# Altium footprint library STC系列芯片.PcbLib: 60 footprints (part 2 of 4)
Each footprint in its own frame and in the unit in brackets; x right, y up, seen from the top. Pads: shape width x height; smd on the part's side, far side on the other; paste and mask are expansions set on the pad; w line width, h text height; cw(c..) or ccw(c..) is an arc to the next point about the centre after c.
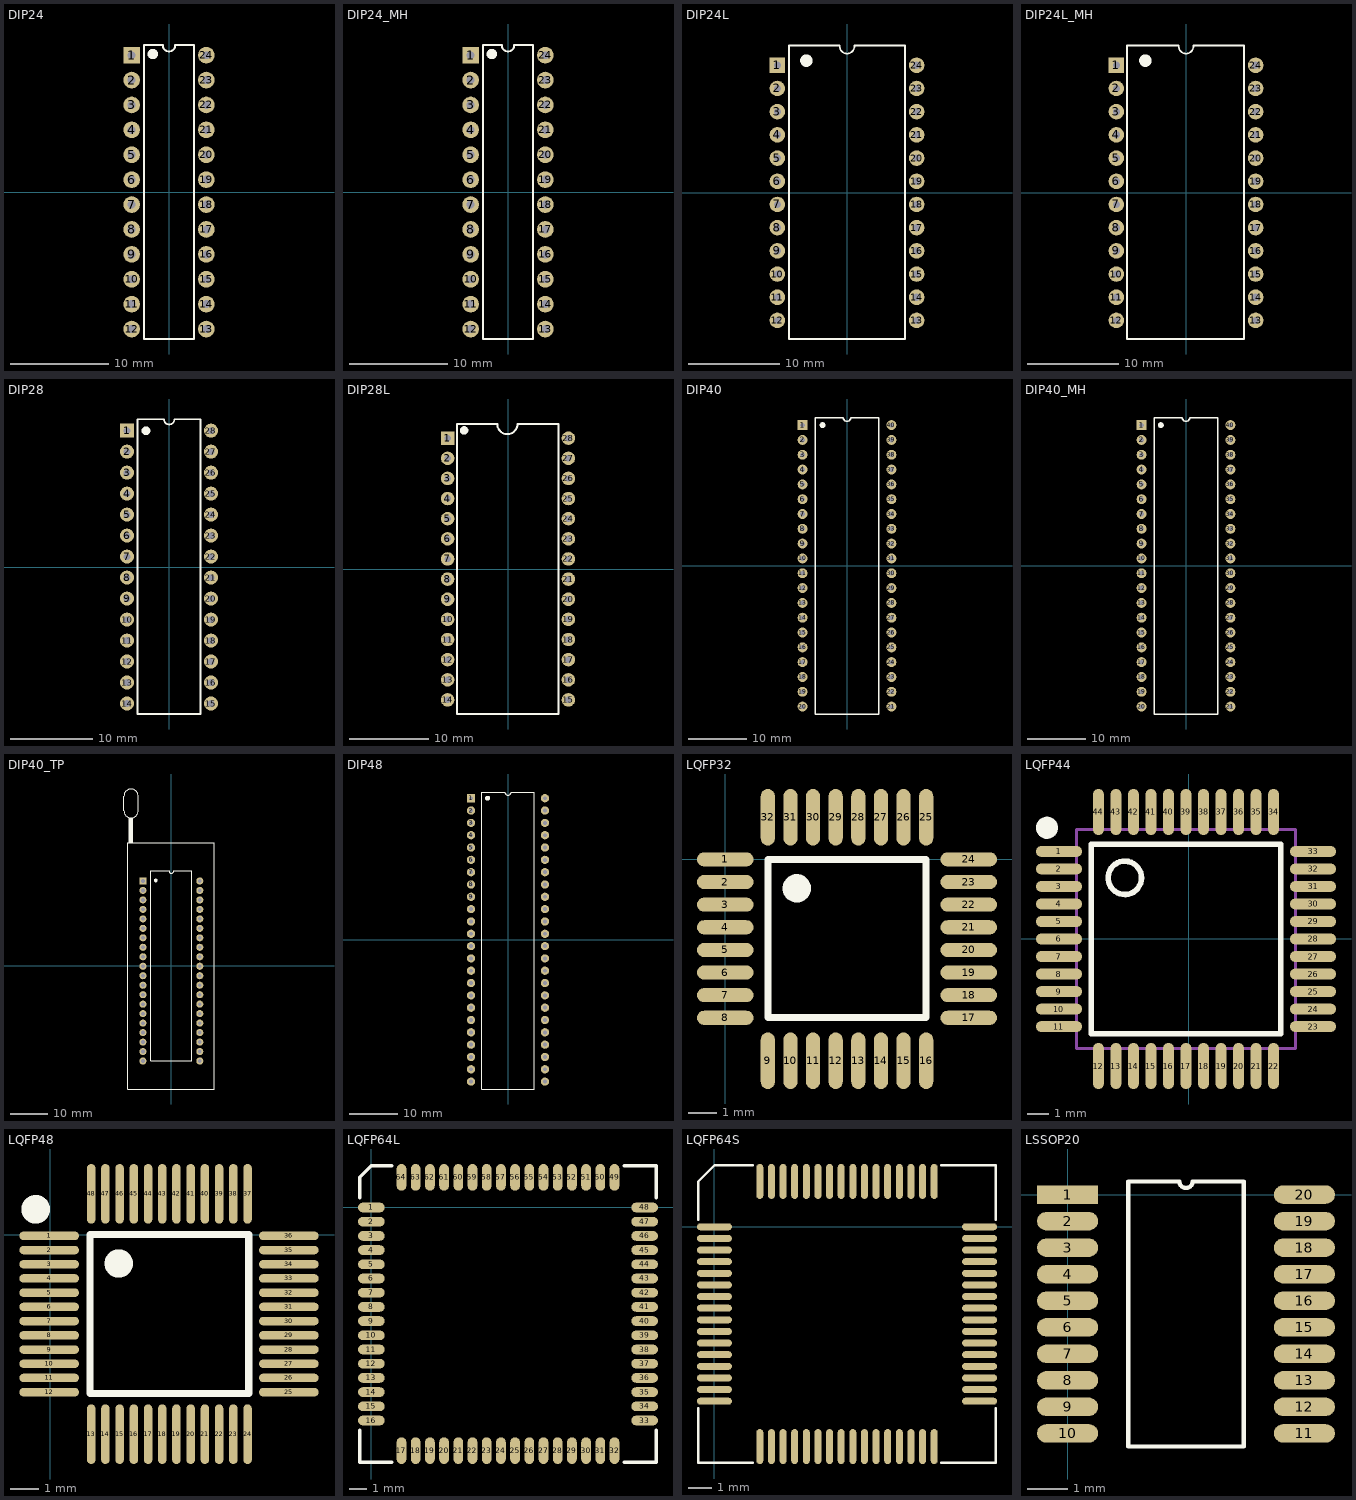
[diagram p1: the footprints below, top view; thin cyan lines are the x and y axes]

## DIP24 [mm]
pads (24):
  rect 1.7x1.7 hole 0.8: 1(-3.81,13.97)
  round 1.7 hole 0.8: 2(-3.81,11.43) 3(-3.81,8.89) 4(-3.81,6.35) 5(-3.81,3.81) 6(-3.81,1.27) 7(-3.81,-1.27) 8(-3.81,-3.81) 9(-3.81,-6.35) 10(-3.81,-8.89) 11(-3.81,-11.43) 12(-3.81,-13.97) 13(3.81,-13.97) 14(3.81,-11.43) 15(3.81,-8.89) 16(3.81,-6.35) 17(3.81,-3.81) 18(3.81,-1.27) 19(3.81,1.27) 20(3.81,3.81) 21(3.81,6.35) 22(3.81,8.89) 23(3.81,11.43) 24(3.81,13.97)
Top Overlay:
  circle w0.8: c-1.651,14.086 r0.127
  lines w0.2: -2.54,-14.986 2.54,-14.986 2.54,14.986 0.635,14.986 cw(c0,14.986) -0.635,14.986 -2.54,14.986 -2.54,-14.986
3D body "DIP24.STEP": height 4.8, standoff -3, extent -4,-15.506 4,15.494

## DIP24_MH [mm]
pads (24):
  rect 1.7x1.7 hole 0.8: 1(-3.81,13.97)
  round 1.7 hole 0.8: 2(-3.81,11.43) 3(-3.81,8.89) 4(-3.81,6.35) 5(-3.81,3.81) 6(-3.81,1.27) 7(-3.81,-1.27) 8(-3.81,-3.81) 9(-3.81,-6.35) 10(-3.81,-8.89) 11(-3.81,-11.43) 12(-3.81,-13.97) 13(3.81,-13.97) 14(3.81,-11.43) 15(3.81,-8.89) 16(3.81,-6.35) 17(3.81,-3.81) 18(3.81,-1.27) 19(3.81,1.27) 20(3.81,3.81) 21(3.81,6.35) 22(3.81,8.89) 23(3.81,11.43) 24(3.81,13.97)
Top Overlay:
  circle w0.8: c-1.651,14.086 r0.127
  lines w0.2: -2.54,-14.986 2.54,-14.986 2.54,14.986 0.635,14.986 cw(c0,14.986) -0.635,14.986 -2.54,14.986 -2.54,-14.986
3D body "DIP24.STEP": height 7.85, standoff 0.04, extent -4,-15.633 4,15.367
3D body "DIP24_MH.STEP": height 4.95, standoff -3.05, extent -5.025,-15.506 5.025,15.494

## DIP24L [mm]
pads (24):
  rect 1.7x1.7 hole 0.8: 1(-7.62,13.97)
  round 1.7 hole 0.8: 2(-7.62,11.43) 3(-7.62,8.89) 4(-7.62,6.35) 5(-7.62,3.81) 6(-7.62,1.27) 7(-7.62,-1.27) 8(-7.62,-3.81) 9(-7.62,-6.35) 10(-7.62,-8.89) 11(-7.62,-11.43) 12(-7.62,-13.97) 13(7.62,-13.97) 14(7.62,-11.43) 15(7.62,-8.89) 16(7.62,-6.35) 17(7.62,-3.81) 18(7.62,-1.27) 19(7.62,1.27) 20(7.62,3.81) 21(7.62,6.35) 22(7.62,8.89) 23(7.62,11.43) 24(7.62,13.97)
Top Overlay:
  circle w1: c-4.445,14.478 r0.18
  lines w0.2: -0.796,16.121 ccw(c0.004,16.044) 0.803,16.134 ; -0.796,16.14 -6.35,16.14 -6.35,-16.002 6.35,-16.002 6.35,16.14 0.803,16.14
3D body "DIP24L.STEP": height 4.75, standoff -3.05, extent -7.713,-16.244 7.747,16.256

## DIP24L_MH [mm]
pads (24):
  rect 1.7x1.7 hole 0.8: 1(-7.62,13.97)
  round 1.7 hole 0.8: 2(-7.62,11.43) 3(-7.62,8.89) 4(-7.62,6.35) 5(-7.62,3.81) 6(-7.62,1.27) 7(-7.62,-1.27) 8(-7.62,-3.81) 9(-7.62,-6.35) 10(-7.62,-8.89) 11(-7.62,-11.43) 12(-7.62,-13.97) 13(7.62,-13.97) 14(7.62,-11.43) 15(7.62,-8.89) 16(7.62,-6.35) 17(7.62,-3.81) 18(7.62,-1.27) 19(7.62,1.27) 20(7.62,3.81) 21(7.62,6.35) 22(7.62,8.89) 23(7.62,11.43) 24(7.62,13.97)
Top Overlay:
  circle w1: c-4.445,14.478 r0.18
  lines w0.2: -0.796,16.121 ccw(c0.004,16.044) 0.803,16.134 ; -0.796,16.14 -6.46,16.14 -6.46,-16.002 6.35,-16.002 6.35,16.14 0.803,16.14
3D body "DIP24L.STEP": height 8.56, standoff 0.76, extent -7.73,-16.371 7.73,16.129
3D body "DIP24L_MH.STEP": height 4.95, standoff -3.05, extent -8.845,-15.506 8.845,15.494

## DIP28 [mm]
pads (28):
  rect 1.7x1.7 hole 0.8: 1(-5.08,16.51)
  round 1.7 hole 0.8: 2(-5.08,13.97) 3(-5.08,11.43) 4(-5.08,8.89) 5(-5.08,6.35) 6(-5.08,3.81) 7(-5.08,1.27) 8(-5.08,-1.27) 9(-5.08,-3.81) 10(-5.08,-6.35) 11(-5.08,-8.89) 12(-5.08,-11.43) 13(-5.08,-13.97) 14(-5.08,-16.51) 15(5.08,-16.51) 16(5.08,-13.97) 17(5.08,-11.43) 18(5.08,-8.89) 19(5.08,-6.35) 20(5.08,-3.81) 21(5.08,-1.27) 22(5.08,1.27) 23(5.08,3.81) 24(5.08,6.35) 25(5.08,8.89) 26(5.08,11.43) 27(5.08,13.97) 28(5.08,16.51)
Top Overlay:
  circle w0.8: c-2.794,16.51 r0.127
  lines w0.2: -3.81,-17.78 -3.81,17.893 -0.61,17.893 ccw(c0.025,17.893) 0.66,17.893 3.81,17.893 3.81,-17.78 -3.81,-17.78
3D body "DIP28.STEP": height 4.5, standoff -3.4, extent -5.153,-18.093 5.407,17.907

## DIP28L [mm]
pads (28):
  rect 1.7x1.7 hole 0.8: 1(-7.62,16.51)
  round 1.7 hole 0.8: 2(-7.62,13.97) 3(-7.62,11.43) 4(-7.62,8.89) 5(-7.62,6.35) 6(-7.62,3.81) 7(-7.62,1.27) 8(-7.62,-1.27) 9(-7.62,-3.81) 10(-7.62,-6.35) 11(-7.62,-8.89) 12(-7.62,-11.43) 13(-7.62,-13.97) 14(-7.62,-16.51) 15(7.62,-16.51) 16(7.62,-13.97) 17(7.62,-11.43) 18(7.62,-8.89) 19(7.62,-6.35) 20(7.62,-3.81) 21(7.62,-1.27) 22(7.62,1.27) 23(7.62,3.81) 24(7.62,6.35) 25(7.62,8.89) 26(7.62,11.43) 27(7.62,13.97) 28(7.62,16.51)
Top Overlay:
  circle w0.8: c-5.537,17.49 r0.127
  lines w0.254: -6.46,18.277 -6.46,-18.288 6.35,-18.288 6.35,18.288 1.185,18.288 cw(c-0.085,18.288) -1.355,18.288 -6.435,18.288
3D body "DIP28.STEP": height 4.7, standoff -3.2, extent -7.78,-18.631 7.78,18.669

## DIP40 [mm]
pads (40):
  rect 1.7x1.7 hole 0.8: 1(-7.62,24.13)
  round 1.7 hole 0.8: 2(-7.62,21.59) 3(-7.62,19.05) 4(-7.62,16.51) 5(-7.62,13.97) 6(-7.62,11.43) 7(-7.62,8.89) 8(-7.62,6.35) 9(-7.62,3.81) 10(-7.62,1.27) 11(-7.62,-1.27) 12(-7.62,-3.81) 13(-7.62,-6.35) 14(-7.62,-8.89) 15(-7.62,-11.43) 16(-7.62,-13.97) 17(-7.62,-16.51) 18(-7.62,-19.05) 19(-7.62,-21.59) 20(-7.62,-24.13) 21(7.62,-24.13) 22(7.62,-21.59) 23(7.62,-19.05) 24(7.62,-16.51) 25(7.62,-13.97) 26(7.62,-11.43) 27(7.62,-8.89) 28(7.62,-6.35) 29(7.62,-3.81) 30(7.62,-1.27) 31(7.62,1.27) 32(7.62,3.81) 33(7.62,6.35) 34(7.62,8.89) 35(7.62,11.43) 36(7.62,13.97) 37(7.62,16.51) 38(7.62,19.05) 39(7.62,21.59) 40(7.62,24.13)
Top Overlay:
  circle w0.508: c-4.191,24.13 r0.254
  lines w0.254: -5.461,-25.4 5.461,-25.4 5.461,25.4 0.635,25.4 cw(c0,25.4) -0.635,25.4 -5.461,25.4 -5.461,-25.4
3D body "DIP40.STEP": height 4.7, standoff -3.2, extent -7.907,-26.191 7.653,26.162

## DIP40_MH [mm]
pads (40):
  rect 1.7x1.7 hole 0.8: 1(-7.62,24.13)
  round 1.7 hole 0.8: 2(-7.62,21.59) 3(-7.62,19.05) 4(-7.62,16.51) 5(-7.62,13.97) 6(-7.62,11.43) 7(-7.62,8.89) 8(-7.62,6.35) 9(-7.62,3.81) 10(-7.62,1.27) 11(-7.62,-1.27) 12(-7.62,-3.81) 13(-7.62,-6.35) 14(-7.62,-8.89) 15(-7.62,-11.43) 16(-7.62,-13.97) 17(-7.62,-16.51) 18(-7.62,-19.05) 19(-7.62,-21.59) 20(-7.62,-24.13) 21(7.62,-24.13) 22(7.62,-21.59) 23(7.62,-19.05) 24(7.62,-16.51) 25(7.62,-13.97) 26(7.62,-11.43) 27(7.62,-8.89) 28(7.62,-6.35) 29(7.62,-3.81) 30(7.62,-1.27) 31(7.62,1.27) 32(7.62,3.81) 33(7.62,6.35) 34(7.62,8.89) 35(7.62,11.43) 36(7.62,13.97) 37(7.62,16.51) 38(7.62,19.05) 39(7.62,21.59) 40(7.62,24.13)
Top Overlay:
  circle w0.508: c-4.318,24.13 r0.254
  lines w0.254: -5.461,-25.4 -5.461,25.4 -0.635,25.4 ccw(c0,25.4) 0.635,25.4 5.461,25.4 5.461,-25.4 -5.461,-25.4
3D body "DIP40.STEP": height 8.51, standoff 0.61, extent -7.907,-26.191 7.653,26.162
3D body "DIP40_MH.STEP": height 5.2, standoff -3, extent -9.027,-25.327 8.773,25.273

## DIP40_TP [mm]
pads (40):
  rect 1.9x1.9 hole 1: 1(-7.62,22.733)
  round 1.9 hole 1: 2(-7.62,20.193) 3(-7.62,17.653) 4(-7.62,15.113) 5(-7.62,12.573) 6(-7.62,10.033) 7(-7.62,7.493) 8(-7.62,4.953) 9(-7.62,2.413) 10(-7.62,-0.127) 11(-7.62,-2.667) 12(-7.62,-5.207) 13(-7.62,-7.747) 14(-7.62,-10.287) 15(-7.62,-12.827) 16(-7.62,-15.367) 17(-7.62,-17.907) 18(-7.62,-20.447) 19(-7.62,-22.987) 20(-7.62,-25.527) 21(7.62,-25.527) 22(7.62,-22.987) 23(7.62,-20.447) 24(7.62,-17.907) 25(7.62,-15.367) 26(7.62,-12.827) 27(7.62,-10.287) 28(7.62,-7.747) 29(7.62,-5.207) 30(7.62,-2.667) 31(7.62,-0.127) 32(7.62,2.413) 33(7.62,4.953) 34(7.62,7.493) 35(7.62,10.033) 36(7.62,12.573) 37(7.62,15.113) 38(7.62,17.653) 39(7.62,20.193) 40(7.62,22.733)
Top Overlay:
  circle w0.508: c-4.191,22.86 r0.254
  lines w0.254: -11.303,33.02 -11.303,39.624 ; -11.049,33.02 -11.049,39.624 ; -10.922,33.147 -10.922,39.497 ; -10.668,33.02 -10.668,39.624 ; -10.414,33.02 -10.414,39.624 ; -12.7,41.529 ccw(c-10.795,41.529) -8.89,41.529 -8.89,45.466 ccw(c-10.795,45.466) -12.7,45.466 -12.7,41.529 ; -11.684,-33.02 11.43,-33.02 11.43,33.02 -11.684,33.02 -11.684,-33.02 ; -5.461,-25.4 5.461,-25.4 5.461,25.4 0.635,25.4 cw(c0,25.4) -0.635,25.4 -5.461,25.4 -5.461,-25.4
3D body "DIP40.STEP": height 16.64, standoff 8.73, extent -7.907,-28.096 7.653,24.257
3D body "DIP40_TP.STEP": height 11.65, standoff -3.15, extent -12.847,-32.707 11.303,47.693

## DIP48 [mm]
pads (48):
  rect 1.7x1.7 hole 0.8: 1(-7.62,29.21)
  round 1.7 hole 0.8: 2(-7.62,26.67) 3(-7.62,24.13) 4(-7.62,21.59) 5(-7.62,19.05) 6(-7.62,16.51) 7(-7.62,13.97) 8(-7.62,11.43) 9(-7.62,8.89) 10(-7.62,6.35) 11(-7.62,3.81) 12(-7.62,1.27) 13(-7.62,-1.27) 14(-7.62,-3.81) 15(-7.62,-6.35) 16(-7.62,-8.89) 17(-7.62,-11.43) 18(-7.62,-13.97) 19(-7.62,-16.51) 20(-7.62,-19.05) 21(-7.62,-21.59) 22(-7.62,-24.13) 23(-7.62,-26.67) 24(-7.62,-29.21) 25(7.62,-29.21) 26(7.62,-26.67) 27(7.62,-24.13) 28(7.62,-21.59) 29(7.62,-19.05) 30(7.62,-16.51) 31(7.62,-13.97) 32(7.62,-11.43) 33(7.62,-8.89) 34(7.62,-6.35) 35(7.62,-3.81) 36(7.62,-1.27) 37(7.62,1.27) 38(7.62,3.81) 39(7.62,6.35) 40(7.62,8.89) 41(7.62,11.43) 42(7.62,13.97) 43(7.62,16.51) 44(7.62,19.05) 45(7.62,21.59) 46(7.62,24.13) 47(7.62,26.67) 48(7.62,29.21)
Top Overlay:
  circle w0.508: c-4.191,29.21 r0.254
  lines w0.254: -5.461,-30.734 -5.461,30.48 -0.635,30.48 ccw(c0,30.48) 0.635,30.48 5.461,30.48 5.461,-30.734 -5.461,-30.734
3D body "DIP48.STEP": height 4.7, standoff -3.2, extent -7.902,-30.756 7.648,30.734

## LQFP32 [mm]
pads (32):
  oval 2x0.5 smd: 1(0,0) 2(0,-0.8) 3(0,-1.6) 4(0,-2.4) 5(0,-3.2) 6(0,-4) 7(0,-4.8) 8(0,-5.6) 17(8.606,-5.6) 18(8.606,-4.8) 19(8.606,-4) 20(8.606,-3.2) 21(8.606,-2.4) 22(8.606,-1.6) 23(8.606,-0.8) 24(8.606,0)
  oval 0.5x2 smd: 9(1.503,-7.117) 10(2.303,-7.117) 11(3.103,-7.117) 12(3.903,-7.117) 13(4.703,-7.117) 14(5.503,-7.117) 15(6.303,-7.117) 16(7.103,-7.117) 25(7.103,1.489) 26(6.303,1.489) 27(5.503,1.489) 28(4.703,1.489) 29(3.903,1.489) 30(3.103,1.489) 31(2.303,1.489) 32(1.503,1.489)
Top Overlay:
  circle w0.5: c2.525,-1.022 r0.25
  lines w0.254: 1.509,-5.594 1.509,-0.006 7.097,-0.006 7.097,-5.594 1.509,-5.594
3D body "LQFP32.STEP": height 1.63, standoff -0.09, extent -0.193,-7.325 8.807,1.675

## LQFP44 [mm]
pads (44):
  oval 2.1x0.5 smd: 1(-5.927,4) 2(-5.927,3.2) 3(-5.927,2.4) 4(-5.927,1.6) 5(-5.927,0.8) 6(-5.927,0) 7(-5.927,-0.8) 8(-5.927,-1.6) 9(-5.927,-2.4) 10(-5.927,-3.2) 11(-5.927,-4) 23(5.673,-4) 24(5.673,-3.2) 25(5.673,-2.4) 26(5.673,-1.6) 27(5.673,-0.8) 28(5.673,0) 29(5.673,0.8) 30(5.673,1.6) 31(5.673,2.4) 32(5.673,3.2) 33(5.673,4)
  oval 0.5x2.1 smd: 12(-4.127,-5.8) 13(-3.327,-5.8) 14(-2.527,-5.8) 15(-1.727,-5.8) 16(-0.927,-5.8) 17(-0.127,-5.8) 18(0.673,-5.8) 19(1.473,-5.8) 20(2.273,-5.8) 21(3.073,-5.8) 22(3.873,-5.8) 34(3.873,5.8) 35(3.073,5.8) 36(2.273,5.8) 37(1.473,5.8) 38(0.673,5.8) 39(-0.127,5.8) 40(-0.927,5.8) 41(-1.727,5.8) 42(-2.527,5.8) 43(-3.327,5.8) 44(-4.127,5.8)
Top Overlay:
  circle w0.254: c-2.921,2.794 r0.762
  circle w0.508: c-6.477,5.08 r0.25
  lines w0.254: -4.445,-4.318 -4.445,4.318 4.191,4.318 4.191,-4.318 -4.445,-4.318
Mechanical 13:
  lines w0.15: -5.127,-5 -5.127,5 4.873,5 4.873,-5 -5.127,-5
3D body "LQFP44.STEP": height 1.5, standoff 0.02, extent -6.127,-6 5.873,6

## LQFP48 [mm]
pads (48):
  oval 2.1x0.3 smd: 1(-0.036,-0.044) 2(-0.036,-0.544) 3(-0.036,-1.044) 4(-0.036,-1.544) 5(-0.036,-2.044) 6(-0.036,-2.544) 7(-0.036,-3.044) 8(-0.036,-3.544) 9(-0.036,-4.044) 10(-0.036,-4.544) 11(-0.036,-5.044) 12(-0.036,-5.544) 25(8.393,-5.544) 26(8.393,-5.044) 27(8.393,-4.544) 28(8.393,-4.044) 29(8.393,-3.544) 30(8.393,-3.044) 31(8.393,-2.544) 32(8.393,-2.044) 33(8.393,-1.544) 34(8.393,-1.044) 35(8.393,-0.544) 36(8.393,-0.044)
  oval 0.3x2.1 smd: 13(1.441,-7.021) 14(1.941,-7.021) 15(2.441,-7.021) 16(2.941,-7.021) 17(3.441,-7.021) 18(3.941,-7.021) 19(4.441,-7.021) 20(4.941,-7.021) 21(5.441,-7.021) 22(5.941,-7.021) 23(6.441,-7.021) 24(6.941,-7.021) 37(6.941,1.433) 38(6.441,1.433) 39(5.941,1.433) 40(5.441,1.433) 41(4.941,1.433) 42(4.441,1.433) 43(3.941,1.433) 44(3.441,1.433) 45(2.941,1.433) 46(2.441,1.433) 47(1.941,1.433) 48(1.441,1.433)
Top Overlay:
  circle w0.5: c2.413,-1.016 r0.25
  circle w0.508: c-0.508,0.889 r0.25
  lines w0.254: 1.397,-5.588 1.397,0 6.985,0 6.985,-5.588 1.397,-5.588
3D body "LQFP48.STEP": height 1.5, standoff 0, extent -0.309,-7.319 8.691,1.681

## LQFP64L [mm]
pads (64):
  oval 1.5x0.55 smd: 1(0,0) 2(0,-0.8) 3(0,-1.6) 4(0,-2.4) 5(0,-3.2) 6(0,-4) 7(0,-4.8) 8(0,-5.6) 9(0,-6.4) 10(0,-7.2) 11(0,-8) 12(0,-8.8) 13(0,-9.6) 14(0,-10.4) 15(0,-11.2) 16(0,-12) 33(15.4,-12) 34(15.4,-11.2) 35(15.4,-10.4) 36(15.4,-9.6) 37(15.4,-8.8) 38(15.4,-8) 39(15.4,-7.2) 40(15.4,-6.4) 41(15.4,-5.6) 42(15.4,-4.8) 43(15.4,-4) 44(15.4,-3.2) 45(15.4,-2.4) 46(15.4,-1.6) 47(15.4,-0.8) 48(15.4,0)
  oval 0.55x1.5 smd: 17(1.7,-13.7) 18(2.5,-13.7) 19(3.3,-13.7) 20(4.1,-13.7) 21(4.9,-13.7) 22(5.7,-13.7) 23(6.5,-13.7) 24(7.3,-13.7) 25(8.1,-13.7) 26(8.9,-13.7) 27(9.7,-13.7) 28(10.5,-13.7) 29(11.3,-13.7) 30(12.1,-13.7) 31(12.9,-13.7) 32(13.7,-13.7) 49(13.7,1.7) 50(12.9,1.7) 51(12.1,1.7) 52(11.3,1.7) 53(10.5,1.7) 54(9.7,1.7) 55(8.9,1.7) 56(8.1,1.7) 57(7.3,1.7) 58(6.5,1.7) 59(5.7,1.7) 60(4.9,1.7) 61(4.1,1.7) 62(3.3,1.7) 63(2.5,1.7) 64(1.7,1.7)
Top Overlay:
  lines w0.2: -0.65,-12.55 -0.65,-14.35 1.15,-14.35 ; -0.65,0.55 -0.65,1.7 0,2.35 1.15,2.35 ; 14.25,-14.35 16.05,-14.35 16.05,-12.55 ; 14.25,2.35 16.05,2.35 16.05,0.55

## LQFP64S [mm]
height 1.6
pads (64):
  oval 1.5x0.3 smd: 1(0,0) 2(0,-0.5) 3(0,-1) 4(0,-1.5) 5(0,-2) 6(0,-2.5) 7(0,-3) 8(0,-3.5) 9(0,-4) 10(0,-4.5) 11(0,-5) 12(0,-5.5) 13(0,-6) 14(0,-6.5) 15(0,-7) 16(0,-7.5) 33(11.4,-7.5) 34(11.4,-7) 35(11.4,-6.5) 36(11.4,-6) 37(11.4,-5.5) 38(11.4,-5) 39(11.4,-4.5) 40(11.4,-4) 41(11.4,-3.5) 42(11.4,-3) 43(11.4,-2.5) 44(11.4,-2) 45(11.4,-1.5) 46(11.4,-1) 47(11.4,-0.5) 48(11.4,0)
  oval 0.3x1.5 smd: 17(1.95,-9.45) 18(2.45,-9.45) 19(2.95,-9.45) 20(3.45,-9.45) 21(3.95,-9.45) 22(4.45,-9.45) 23(4.95,-9.45) 24(5.45,-9.45) 25(5.95,-9.45) 26(6.45,-9.45) 27(6.95,-9.45) 28(7.45,-9.45) 29(7.95,-9.45) 30(8.45,-9.45) 31(8.95,-9.45) 32(9.45,-9.45) 49(9.45,1.95) 50(8.95,1.95) 51(8.45,1.95) 52(7.95,1.95) 53(7.45,1.95) 54(6.95,1.95) 55(6.45,1.95) 56(5.95,1.95) 57(5.45,1.95) 58(4.95,1.95) 59(4.45,1.95) 60(3.95,1.95) 61(3.45,1.95) 62(2.95,1.95) 63(2.45,1.95) 64(1.95,1.95)
Top Overlay:
  lines w0.1: -0.7,-7.8 -0.7,-10.15 1.65,-10.15 ; -0.7,0.3 -0.7,1.95 0,2.65 1.65,2.65 ; 9.75,-10.15 12.1,-10.15 12.1,-7.8 ; 9.75,2.65 12.1,2.65 12.1,0.3

## LSSOP20 [mm]
pads (20):
  rect 1.5x0.45 smd: 1(0,0)
  oval 1.5x0.45 smd: 2(0,-0.65) 3(0,-1.3) 4(0,-1.95) 5(0,-2.6) 6(0,-3.25) 7(0,-3.9) 8(0,-4.55) 9(0,-5.2) 10(0,-5.85) 11(5.8,-5.85) 12(5.8,-5.2) 13(5.8,-4.55) 14(5.8,-3.9) 15(5.8,-3.25) 16(5.8,-2.6) 17(5.8,-1.95) 18(5.8,-1.3) 19(5.8,-0.65) 20(5.8,0)
Top Overlay:
  lines w0.1: 1.485,-6.175 1.485,0.325 2.738,0.325 ccw(c2.9,0.325) 3.062,0.325 4.315,0.325 4.315,-6.175 1.485,-6.175